# Altium schematic symbol library J0011D21BNL.SchLib: 1 symbol
Pins are listed as number, name and electrical type; pins without a type are passive.

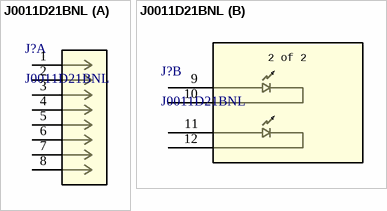
[diagram p0: symbol J0011D21BNL]

## J0011D21BNL
designator J?
No Description Available; Manufacturer_Name: Pulse Electronics Corporation; Copyright: Copyright (C) 2026 Ultra Librarian. All rights reserved.; Manufacturer_Part_Number: J0011D21BNL; RefDes: RefDes; Type: Type
footprint CONN_J0011D21B_PUL
part A pins: 1, 2, 3, 4, 5, 6, 7, 8
part B pins: 9, 10, 11, 12
part B text: 2 of 2